# Altium footprint library IC-QFN.PcbLib: 94 footprints (part 4 of 6)
Each footprint in its own frame and in the unit in brackets; x right, y up, seen from the top. Pads: shape width x height; smd on the part's side, far side on the other; paste and mask are expansions set on the pad; w line width, h text height; cw(c..) or ccw(c..) is an arc to the next point about the centre after c.
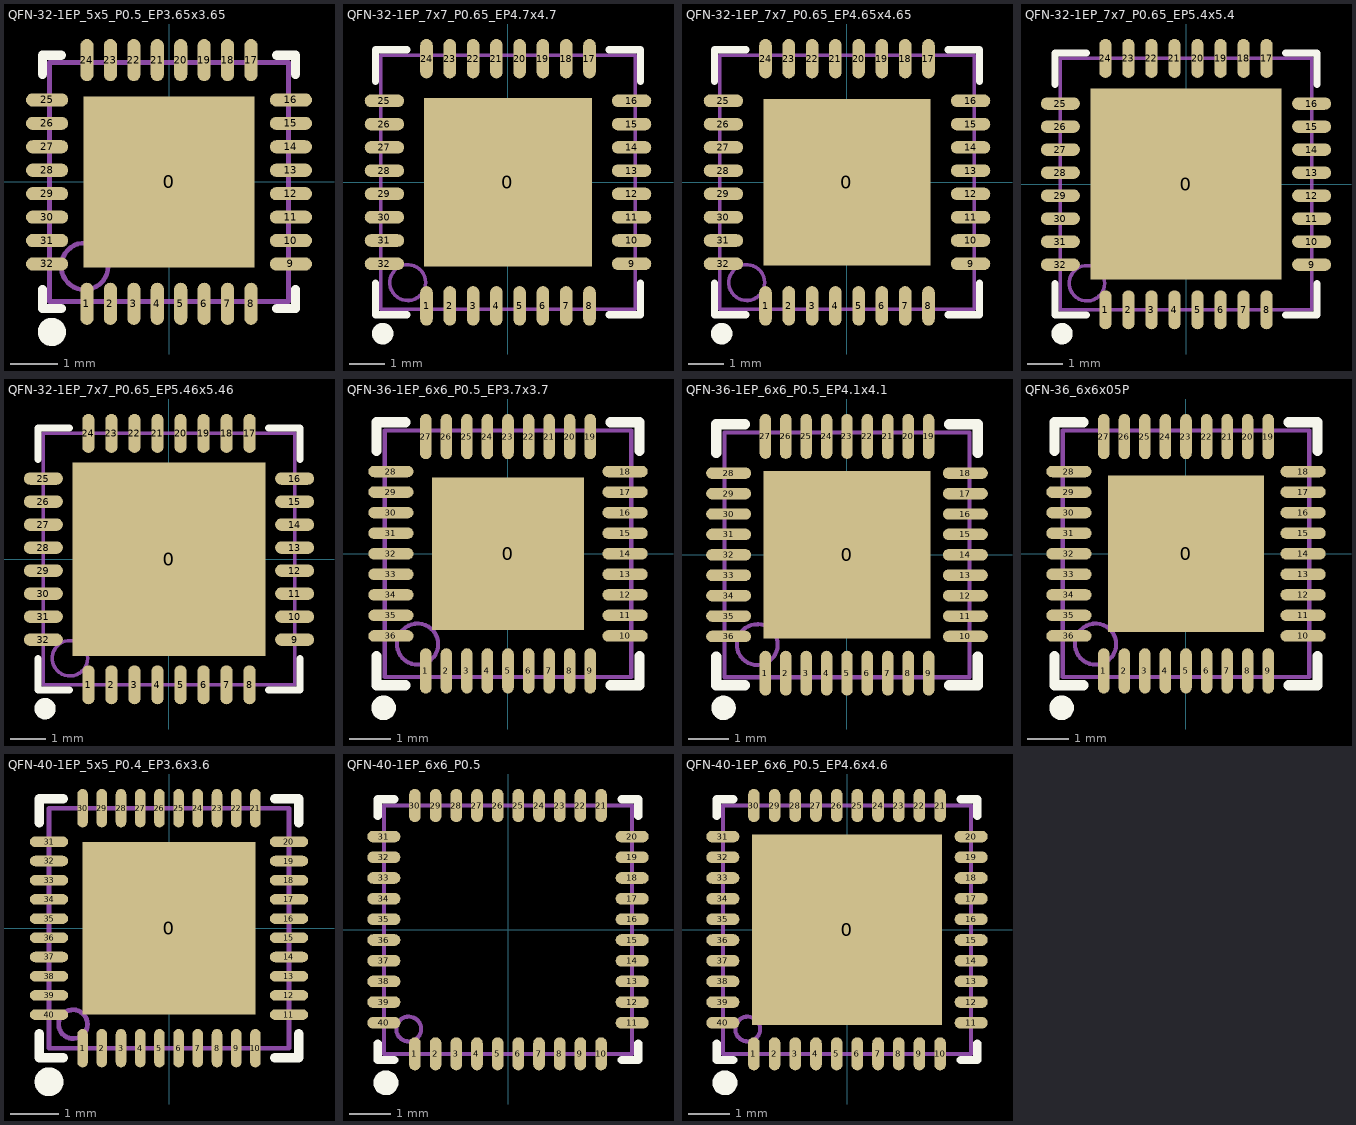
[diagram p3: the footprints below, top view; thin cyan lines are the x and y axes]

## QFN-32-1EP_5x5_P0.5_EP3.65x3.65 [mm]
pads (33):
  rect 3.65x3.65 smd mask+0.051: 0(0,0)
  oval 0.28x0.9 smd mask+0.051: 1(-1.75,-2.6) 2(-1.25,-2.6) 3(-0.75,-2.6) 4(-0.25,-2.6) 5(0.25,-2.6) 6(0.75,-2.6) 7(1.25,-2.6) 8(1.75,-2.6) 17(1.75,2.6) 18(1.25,2.6) 19(0.75,2.6) 20(0.25,2.6) 21(-0.25,2.6) 22(-0.75,2.6) 23(-1.25,2.6) 24(-1.75,2.6)
  oval 0.9x0.28 smd mask+0.051: 9(2.6,-1.75) 10(2.6,-1.25) 11(2.6,-0.75) 12(2.6,-0.25) 13(2.6,0.25) 14(2.6,0.75) 15(2.6,1.25) 16(2.6,1.75) 25(-2.6,1.75) 26(-2.6,1.25) 27(-2.6,0.75) 28(-2.6,0.25) 29(-2.6,-0.25) 30(-2.6,-0.75) 31(-2.6,-1.25) 32(-2.6,-1.75)
Top Overlay:
  circle w0.3: c-2.5,-3.2 r0.15
  lines w0.2: -2.7,-2.295 -2.7,-2.7 -2.295,-2.7 ; -2.7,2.295 -2.7,2.7 -2.295,2.7 ; 2.295,-2.7 2.7,-2.7 2.7,-2.295 ; 2.295,2.7 2.7,2.7 2.7,2.295
Mechanical 13:
  circle w0.1: c-1.8,-1.8 r0.5
  lines w0.1: -2.55,-2.55 2.55,-2.55 2.55,2.55 -2.55,2.55 -2.55,-2.55

## QFN-32-1EP_7x7_P0.65_EP4.7x4.7 [mm]
pads (33):
  rect 4.7x4.7 smd mask+0.051: 0(0,0)
  oval 0.35x1.1 smd mask+0.051: 1(-2.275,-3.45) 2(-1.625,-3.45) 3(-0.975,-3.45) 4(-0.325,-3.45) 5(0.325,-3.45) 6(0.975,-3.45) 7(1.625,-3.45) 8(2.275,-3.45) 17(2.275,3.45) 18(1.625,3.45) 19(0.975,3.45) 20(0.325,3.45) 21(-0.325,3.45) 22(-0.975,3.45) 23(-1.625,3.45) 24(-2.275,3.45)
  oval 1.1x0.35 smd mask+0.051: 9(3.45,-2.275) 10(3.45,-1.625) 11(3.45,-0.975) 12(3.45,-0.325) 13(3.45,0.325) 14(3.45,0.975) 15(3.45,1.625) 16(3.45,2.275) 25(-3.45,2.275) 26(-3.45,1.625) 27(-3.45,0.975) 28(-3.45,0.325) 29(-3.45,-0.325) 30(-3.45,-0.975) 31(-3.45,-1.625) 32(-3.45,-2.275)
Top Overlay:
  circle w0.3: c-3.5,-4.225 r0.15
  lines w0.2: -3.7,-2.815 -3.7,-3.7 -2.815,-3.7 ; -3.7,2.815 -3.7,3.7 -2.815,3.7 ; 2.815,-3.7 3.7,-3.7 3.7,-2.815 ; 2.815,3.7 3.7,3.7 3.7,2.815
Mechanical 13:
  circle w0.1: c-2.8,-2.8 r0.5
  lines w0.1: -3.55,-3.55 -3.55,3.55 3.55,3.55 3.55,-3.55 -3.55,-3.55

## QFN-32-1EP_7x7_P0.65_EP4.65x4.65 [mm]
pads (33):
  rect 4.65x4.65 smd mask+0.051: 0(0,0)
  oval 0.35x1.1 smd mask+0.051: 1(-2.275,-3.45) 2(-1.625,-3.45) 3(-0.975,-3.45) 4(-0.325,-3.45) 5(0.325,-3.45) 6(0.975,-3.45) 7(1.625,-3.45) 8(2.275,-3.45) 17(2.275,3.45) 18(1.625,3.45) 19(0.975,3.45) 20(0.325,3.45) 21(-0.325,3.45) 22(-0.975,3.45) 23(-1.625,3.45) 24(-2.275,3.45)
  oval 1.1x0.35 smd mask+0.051: 9(3.45,-2.275) 10(3.45,-1.625) 11(3.45,-0.975) 12(3.45,-0.325) 13(3.45,0.325) 14(3.45,0.975) 15(3.45,1.625) 16(3.45,2.275) 25(-3.45,2.275) 26(-3.45,1.625) 27(-3.45,0.975) 28(-3.45,0.325) 29(-3.45,-0.325) 30(-3.45,-0.975) 31(-3.45,-1.625) 32(-3.45,-2.275)
Top Overlay:
  circle w0.3: c-3.5,-4.225 r0.15
  lines w0.2: -3.7,-2.815 -3.7,-3.7 -2.815,-3.7 ; -3.7,2.815 -3.7,3.7 -2.815,3.7 ; 2.815,-3.7 3.7,-3.7 3.7,-2.815 ; 2.815,3.7 3.7,3.7 3.7,2.815
Mechanical 13:
  circle w0.1: c-2.8,-2.8 r0.5
  lines w0.1: -3.55,-3.55 3.55,-3.55 3.55,3.55 -3.55,3.55 -3.55,-3.55

## QFN-32-1EP_7x7_P0.65_EP5.4x5.4 [mm]
pads (33):
  rect 5.4x5.4 smd mask+0.051: 0(0,0)
  oval 0.35x1.1 smd mask+0.051: 1(-2.275,-3.55) 2(-1.625,-3.55) 3(-0.975,-3.55) 4(-0.325,-3.55) 5(0.325,-3.55) 6(0.975,-3.55) 7(1.625,-3.55) 8(2.275,-3.55) 17(2.275,3.55) 18(1.625,3.55) 19(0.975,3.55) 20(0.325,3.55) 21(-0.325,3.55) 22(-0.975,3.55) 23(-1.625,3.55) 24(-2.275,3.55)
  oval 1.1x0.35 smd mask+0.051: 9(3.55,-2.275) 10(3.55,-1.625) 11(3.55,-0.975) 12(3.55,-0.325) 13(3.55,0.325) 14(3.55,0.975) 15(3.55,1.625) 16(3.55,2.275) 25(-3.55,2.275) 26(-3.55,1.625) 27(-3.55,0.975) 28(-3.55,0.325) 29(-3.55,-0.325) 30(-3.55,-0.975) 31(-3.55,-1.625) 32(-3.55,-2.275)
Top Overlay:
  circle w0.3: c-3.5,-4.225 r0.15
  lines w0.2: -3.7,-2.815 -3.7,-3.7 -2.815,-3.7 ; -3.7,2.815 -3.7,3.7 -2.815,3.7 ; 2.815,-3.7 3.7,-3.7 3.7,-2.815 ; 2.815,3.7 3.7,3.7 3.7,2.815
Mechanical 13:
  circle w0.1: c-2.8,-2.8 r0.5
  lines w0.1: -3.55,-3.55 3.55,-3.55 3.55,3.55 -3.55,3.55 -3.55,-3.55

## QFN-32-1EP_7x7_P0.65_EP5.46x5.46 [mm]
pads (33):
  rect 5.46x5.46 smd mask+0.051: 0(0,0)
  oval 0.35x1.1 smd mask+0.051: 1(-2.275,-3.55) 2(-1.625,-3.55) 3(-0.975,-3.55) 4(-0.325,-3.55) 5(0.325,-3.55) 6(0.975,-3.55) 7(1.625,-3.55) 8(2.275,-3.55) 17(2.275,3.55) 18(1.625,3.55) 19(0.975,3.55) 20(0.325,3.55) 21(-0.325,3.55) 22(-0.975,3.55) 23(-1.625,3.55) 24(-2.275,3.55)
  oval 1.1x0.35 smd mask+0.051: 9(3.55,-2.275) 10(3.55,-1.625) 11(3.55,-0.975) 12(3.55,-0.325) 13(3.55,0.325) 14(3.55,0.975) 15(3.55,1.625) 16(3.55,2.275) 25(-3.55,2.275) 26(-3.55,1.625) 27(-3.55,0.975) 28(-3.55,0.325) 29(-3.55,-0.325) 30(-3.55,-0.975) 31(-3.55,-1.625) 32(-3.55,-2.275)
Top Overlay:
  circle w0.3: c-3.5,-4.225 r0.15
  lines w0.2: -3.7,-2.815 -3.7,-3.7 -2.815,-3.7 ; -3.7,2.815 -3.7,3.7 -2.815,3.7 ; 2.815,-3.7 3.7,-3.7 3.7,-2.815 ; 2.815,3.7 3.7,3.7 3.7,2.815
Mechanical 13:
  circle w0.1: c-2.8,-2.8 r0.5
  lines w0.1: -3.55,-3.55 -3.55,3.55 3.55,3.55 3.55,-3.55 -3.55,-3.55

## QFN-36-1EP_5x6_P0.5_EP3.6x4.1 [mm]

## QFN-36-1EP_5x6_P0.5_EP3.6x4.6 [mm]

## QFN-36-1EP_6x6_P0.5_EP3.7x3.7 [mm]
pads (37):
  rect 3.7x3.7 smd mask+0.051: 0(0,0)
  oval 0.28x1.1 smd mask+0.051: 1(-2,-2.85) 2(-1.5,-2.85) 3(-1,-2.85) 4(-0.5,-2.85) 5(0,-2.85) 6(0.5,-2.85) 7(1,-2.85) 8(1.5,-2.85) 9(2,-2.85) 19(2,2.85) 20(1.5,2.85) 21(1,2.85) 22(0.5,2.85) 23(0,2.85) 24(-0.5,2.85) 25(-1,2.85) 26(-1.5,2.85) 27(-2,2.85)
  oval 1.1x0.28 smd mask+0.051: 10(2.85,-2) 11(2.85,-1.5) 12(2.85,-1) 13(2.85,-0.5) 14(2.85,0) 15(2.85,0.5) 16(2.85,1) 17(2.85,1.5) 18(2.85,2) 28(-2.85,2) 29(-2.85,1.5) 30(-2.85,1) 31(-2.85,0.5) 32(-2.85,0) 33(-2.85,-0.5) 34(-2.85,-1) 35(-2.85,-1.5) 36(-2.85,-2)
Top Overlay:
  circle w0.3: c-3.025,-3.75 r0.15
  lines w0.254: -3.2,-2.5 -3.2,-3.2 -2.5,-3.2 ; -3.2,2.5 -3.2,3.2 -2.5,3.2 ; 2.5,-3.2 3.2,-3.2 3.2,-2.5 ; 2.5,3.2 3.2,3.2 3.2,2.5
Mechanical 13:
  circle w0.1: c-2.2,-2.2 r0.5
  lines w0.1: -3,-3 -3,3 3,3 3,-3 -3,-3

## QFN-36-1EP_6x6_P0.5_EP4.1x4.1 [mm]
pads (37):
  rect 4.1x4.1 smd mask+0.051: 0(0,0)
  oval 0.28x1.1 smd mask+0.051: 1(-2,-2.9) 2(-1.5,-2.9) 3(-1,-2.9) 4(-0.5,-2.9) 5(0,-2.9) 6(0.5,-2.9) 7(1,-2.9) 8(1.5,-2.9) 9(2,-2.9) 19(2,2.9) 20(1.5,2.9) 21(1,2.9) 22(0.5,2.9) 23(0,2.9) 24(-0.5,2.9) 25(-1,2.9) 26(-1.5,2.9) 27(-2,2.9)
  oval 1.1x0.28 smd mask+0.051: 10(2.9,-2) 11(2.9,-1.5) 12(2.9,-1) 13(2.9,-0.5) 14(2.9,0) 15(2.9,0.5) 16(2.9,1) 17(2.9,1.5) 18(2.9,2) 28(-2.9,2) 29(-2.9,1.5) 30(-2.9,1) 31(-2.9,0.5) 32(-2.9,0) 33(-2.9,-0.5) 34(-2.9,-1) 35(-2.9,-1.5) 36(-2.9,-2)
Top Overlay:
  circle w0.3: c-3.025,-3.75 r0.15
  lines w0.254: -3.2,-2.5 -3.2,-3.2 -2.5,-3.2 ; -3.2,2.5 -3.2,3.2 -2.5,3.2 ; 2.5,-3.2 3.2,-3.2 3.2,-2.5 ; 2.5,3.2 3.2,3.2 3.2,2.5
Mechanical 13:
  circle w0.1: c-2.2,-2.2 r0.5
  lines w0.1: -3,-3 -3,3 3,3 3,-3 -3,-3

## QFN-36_6x6x05P [mm]
pads (37):
  rect 3.8x3.8 smd mask+0.051: 0(0,0)
  oval 0.28x1.1 smd mask+0.051: 1(-2,-2.85) 2(-1.5,-2.85) 3(-1,-2.85) 4(-0.5,-2.85) 5(0,-2.85) 6(0.5,-2.85) 7(1,-2.85) 8(1.5,-2.85) 9(2,-2.85) 19(2,2.85) 20(1.5,2.85) 21(1,2.85) 22(0.5,2.85) 23(0,2.85) 24(-0.5,2.85) 25(-1,2.85) 26(-1.5,2.85) 27(-2,2.85)
  oval 1.1x0.28 smd mask+0.051: 10(2.85,-2) 11(2.85,-1.5) 12(2.85,-1) 13(2.85,-0.5) 14(2.85,0) 15(2.85,0.5) 16(2.85,1) 17(2.85,1.5) 18(2.85,2) 28(-2.85,2) 29(-2.85,1.5) 30(-2.85,1) 31(-2.85,0.5) 32(-2.85,0) 33(-2.85,-0.5) 34(-2.85,-1) 35(-2.85,-1.5) 36(-2.85,-2)
Top Overlay:
  circle w0.3: c-3.025,-3.75 r0.15
  lines w0.254: -3.2,-2.5 -3.2,-3.2 -2.5,-3.2 ; -3.2,2.5 -3.2,3.2 -2.5,3.2 ; 2.5,-3.2 3.2,-3.2 3.2,-2.5 ; 2.5,3.2 3.2,3.2 3.2,2.5
Mechanical 13:
  circle w0.1: c-2.2,-2.2 r0.5
  lines w0.1: -3,-3 3,-3 3,3 -3,3 -3,-3

## QFN-38-1EP_4x6_P0.4_EP2.65x4.65 [mm]

## QFN-38-1EP_5x7_P0.5_EP3.15x5.15 [mm]

## QFN-40-1EP_5x5_P0.4_EP3.6x3.6 [mm]
pads (41):
  rect 3.6x3.6 smd mask+0.051: 0(0,0)
  oval 0.22x0.8 smd mask+0.051: 1(-1.8,-2.5) 2(-1.4,-2.5) 3(-1,-2.5) 4(-0.6,-2.5) 5(-0.2,-2.5) 6(0.2,-2.5) 7(0.6,-2.5) 8(1,-2.5) 9(1.4,-2.5) 10(1.8,-2.5) 21(1.8,2.5) 22(1.4,2.5) 23(1,2.5) 24(0.6,2.5) 25(0.2,2.5) 26(-0.2,2.5) 27(-0.6,2.5) 28(-1,2.5) 29(-1.4,2.5) 30(-1.8,2.5)
  oval 0.8x0.22 smd mask+0.051: 11(2.5,-1.8) 12(2.5,-1.4) 13(2.5,-1) 14(2.5,-0.6) 15(2.5,-0.2) 16(2.5,0.2) 17(2.5,0.6) 18(2.5,1) 19(2.5,1.4) 20(2.5,1.8) 31(-2.5,1.8) 32(-2.5,1.4) 33(-2.5,1) 34(-2.5,0.6) 35(-2.5,0.2) 36(-2.5,-0.2) 37(-2.5,-0.6) 38(-2.5,-1) 39(-2.5,-1.4) 40(-2.5,-1.8)
Top Overlay:
  circle w0.3: c-2.5,-3.2 r0.15
  lines w0.2: -2.7,-2.2 -2.7,-2.7 -2.2,-2.7 ; -2.7,2.2 -2.7,2.7 -2.2,2.7 ; 2.2,-2.7 2.7,-2.7 2.7,-2.2 ; 2.2,2.7 2.7,2.7 2.7,2.2
Mechanical 13:
  circle w0.1: c-2,-2 r0.3
  lines w0.1: -2.5,-2.5 2.5,-2.5 2.5,2.5 -2.5,2.5 -2.5,-2.5

## QFN-40-1EP_6x6_P0.5 [mm]
pads (40):
  oval 0.28x0.8 smd mask+0.051: 1(-2.25,-3) 2(-1.75,-3) 3(-1.25,-3) 4(-0.75,-3) 5(-0.25,-3) 6(0.25,-3) 7(0.75,-3) 8(1.25,-3) 9(1.75,-3) 10(2.25,-3) 21(2.25,3) 22(1.75,3) 23(1.25,3) 24(0.75,3) 25(0.25,3) 26(-0.25,3) 27(-0.75,3) 28(-1.25,3) 29(-1.75,3) 30(-2.25,3)
  oval 0.8x0.28 smd mask+0.051: 11(3,-2.25) 12(3,-1.75) 13(3,-1.25) 14(3,-0.75) 15(3,-0.25) 16(3,0.25) 17(3,0.75) 18(3,1.25) 19(3,1.75) 20(3,2.25) 31(-3,2.25) 32(-3,1.75) 33(-3,1.25) 34(-3,0.75) 35(-3,0.25) 36(-3,-0.25) 37(-3,-0.75) 38(-3,-1.25) 39(-3,-1.75) 40(-3,-2.25)
Top Overlay:
  circle w0.3: c-2.95,-3.7 r0.15
  lines w0.2: -3.15,-2.75 -3.15,-3.15 -2.75,-3.15 ; -3.15,2.75 -3.15,3.15 -2.75,3.15 ; 2.75,-3.15 3.15,-3.15 3.15,-2.75 ; 2.75,3.15 3.15,3.15 3.15,2.75
Mechanical 13:
  circle w0.1: c-2.4,-2.4 r0.3
  lines w0.1: -3,-3 -3,3 3,3 3,-3 -3,-3

## QFN-40-1EP_6x6_P0.5_EP4.6x4.6 [mm]
pads (41):
  rect 4.6x4.6 smd mask+0.051: 0(0,0)
  oval 0.28x0.8 smd mask+0.051: 1(-2.25,-3) 2(-1.75,-3) 3(-1.25,-3) 4(-0.75,-3) 5(-0.25,-3) 6(0.25,-3) 7(0.75,-3) 8(1.25,-3) 9(1.75,-3) 10(2.25,-3) 21(2.25,3) 22(1.75,3) 23(1.25,3) 24(0.75,3) 25(0.25,3) 26(-0.25,3) 27(-0.75,3) 28(-1.25,3) 29(-1.75,3) 30(-2.25,3)
  oval 0.8x0.28 smd mask+0.051: 11(3,-2.25) 12(3,-1.75) 13(3,-1.25) 14(3,-0.75) 15(3,-0.25) 16(3,0.25) 17(3,0.75) 18(3,1.25) 19(3,1.75) 20(3,2.25) 31(-3,2.25) 32(-3,1.75) 33(-3,1.25) 34(-3,0.75) 35(-3,0.25) 36(-3,-0.25) 37(-3,-0.75) 38(-3,-1.25) 39(-3,-1.75) 40(-3,-2.25)
Top Overlay:
  circle w0.3: c-2.95,-3.7 r0.15
  lines w0.2: -3.15,-2.75 -3.15,-3.15 -2.75,-3.15 ; -3.15,2.75 -3.15,3.15 -2.75,3.15 ; 2.75,-3.15 3.15,-3.15 3.15,-2.75 ; 2.75,3.15 3.15,3.15 3.15,2.75
Mechanical 13:
  circle w0.1: c-2.4,-2.4 r0.3
  lines w0.1: -3,-3 3,-3 3,3 -3,3 -3,-3

## QFN-42-1EP_5x6_P0.4_EP3.7x4.7 [mm]